# Altium schematic symbol library SCH_Passive.SchLib: 21 symbols
Pins are listed as number, name and electrical type; pins without a type are passive.

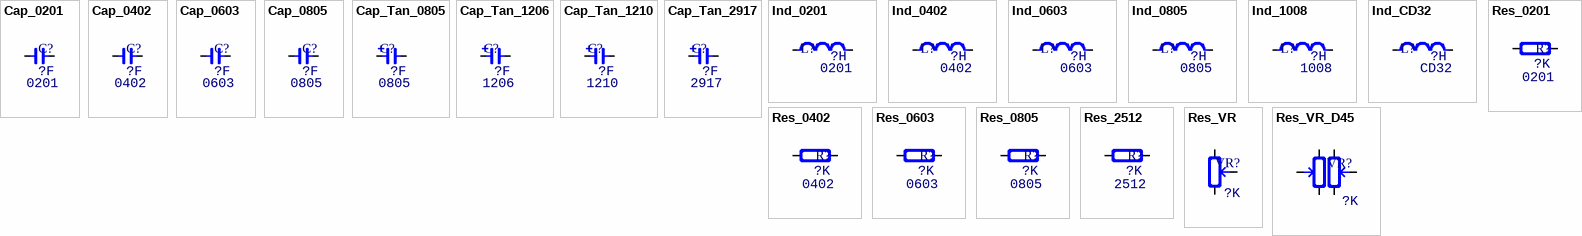
[diagram p0: symbols Cap_0201 to Res_VR_D45]

## Cap_0201
designator C?, comment Type: 0201  (hidden comment: ?F)
Capacitor; Specification: X7R 50V; Manufacturer: *; Value: ?F
footprint CAP_0201
pins: 1, 2

## Cap_0402
designator C?, comment Type: 0402  (hidden comment: ?F)
Capacitor; Specification: X7R 50V; Manufacturer: *; Value: ?F
footprint CAP_0402
pins: 1, 2

## Cap_0603
designator C?, comment Type: 0603  (hidden comment: ?F)
Capacitor; Specification: X7R 50V; Manufacturer: *; Value: ?F
footprint CAP_0603
pins: 1, 2

## Cap_0805
designator C?, comment Type: 0805  (hidden comment: ?F)
Capacitor; Specification: X7R 50V; Manufacturer: *; Value: ?F
footprint CAP_0805
pins: 1, 2

## Cap_Tan_0805
designator C?, comment Type: 0805  (hidden comment: ?F)
Capacitor Tantalum; Specification: X5R 10V; Manufacturer: *; Value: ?F
footprint CAP_TAN_P0805
pins: 1, 2
1 alternate drawing of the same symbol

## Cap_Tan_1206
designator C?, comment Type: 1206  (hidden comment: ?F)
Capacitor Tantalum; Specification: X5R 10V; Manufacturer: *; Value: ?F
footprint CAP_TAN_A1206
pins: 1, 2
1 alternate drawing of the same symbol

## Cap_Tan_1210
designator C?, comment Type: 1210  (hidden comment: ?F)
Capacitor Tantalum; Specification: X5R 10V; Manufacturer: *; Value: ?F
footprint CAP_TAN_B1210
pins: 1, 2
1 alternate drawing of the same symbol

## Cap_Tan_2917
designator C?, comment Type: 2917  (hidden comment: ?F)
Capacitor Tantalum; Specification: X5R 10V; Manufacturer: *; Value: ?F
footprint CAP_TAN_D2917
pins: 1, 2
1 alternate drawing of the same symbol

## Ind_0201
designator L?, comment Type: 0201  (hidden comment: ?H)
Inductor; Specification: ±5% 100mA; Manufacturer: *; Value: ?H
footprint IND_0201
pins: 1, 2

## Ind_0402
designator L?, comment Type: 0402  (hidden comment: ?H)
Inductor; Specification: ±5% 100mA; Manufacturer: *; Value: ?H
footprint IND_0402
pins: 1, 2

## Ind_0603
designator L?, comment Type: 0603  (hidden comment: ?H)
Inductor; Specification: ±5% 100mA; Manufacturer: *; Value: ?H
footprint IND_0603
pins: 1, 2

## Ind_0805
designator L?, comment Type: 0805  (hidden comment: ?H)
Inductor; Specification: ±5% 100mA; Manufacturer: *; Value: ?H
footprint IND_0805
pins: 1, 2

## Ind_1008
designator L?, comment Type: 1008  (hidden comment: ?H)
Inductor; Specification: ±5% 100mA; Manufacturer: *; Value: ?H
footprint IND_1008
pins: 1, 2

## Ind_CD32
designator L?, comment Type: CD32  (hidden comment: ?H)
Inductor; Specification: ±5% 100mA; Manufacturer: *; Value: ?H
footprint IND_CD32
pins: 1, 2

## Res_0201
designator R?, comment Type: 0201  (hidden comment: ?K)
Resistor; Specification: ±5%; Manufacturer: *; Value: ?K
footprint RES_0201
pins: 1, 2

## Res_0402
designator R?, comment Type: 0402  (hidden comment: ?K)
Resistor; Specification: ±5%; Manufacturer: *; Value: ?K
footprint RES_0402
pins: 1, 2

## Res_0603
designator R?, comment Type: 0603  (hidden comment: ?K)
Resistor; Specification: ±5%; Manufacturer: *; Value: ?K
footprint RES_0603
pins: 1, 2

## Res_0805
designator R?, comment Type: 0805  (hidden comment: ?K)
Resistor; Specification: ±5%; Manufacturer: *; Value: ?K
footprint RES_0805
pins: 1, 2

## Res_2512
designator R?, comment Type: 2512  (hidden comment: ?K)
Resistor; Specification: ±5%; Manufacturer: *; Value: ?K
footprint RES_2512
pins: 1, 2

## Res_VR
designator VR?, comment ?K
Resistor Variable; Specification: ±5%; Manufacturer: *; Type: VR; Value: ?K
footprint RES_VR_Gear
pins: 1, 2, 3

## Res_VR_D45
designator VR?, comment ?K
Resistor Variable; Specification: ±5%; Manufacturer: *; Type: VR_D45; Value: ?K
footprint RES_VR_D45mm
pins: 1 U, 2 W, 3 U, 4 W, 5 D, 6 D